# Altium footprint library FootPrintLib_1.PcbLib: 498 footprints (part 17 of 35)
Each footprint in its own frame and in the unit in brackets; x right, y up, seen from the top. Pads: shape width x height; smd on the part's side, far side on the other; paste and mask are expansions set on the pad; w line width, h text height; cw(c..) or ccw(c..) is an arc to the next point about the centre after c.
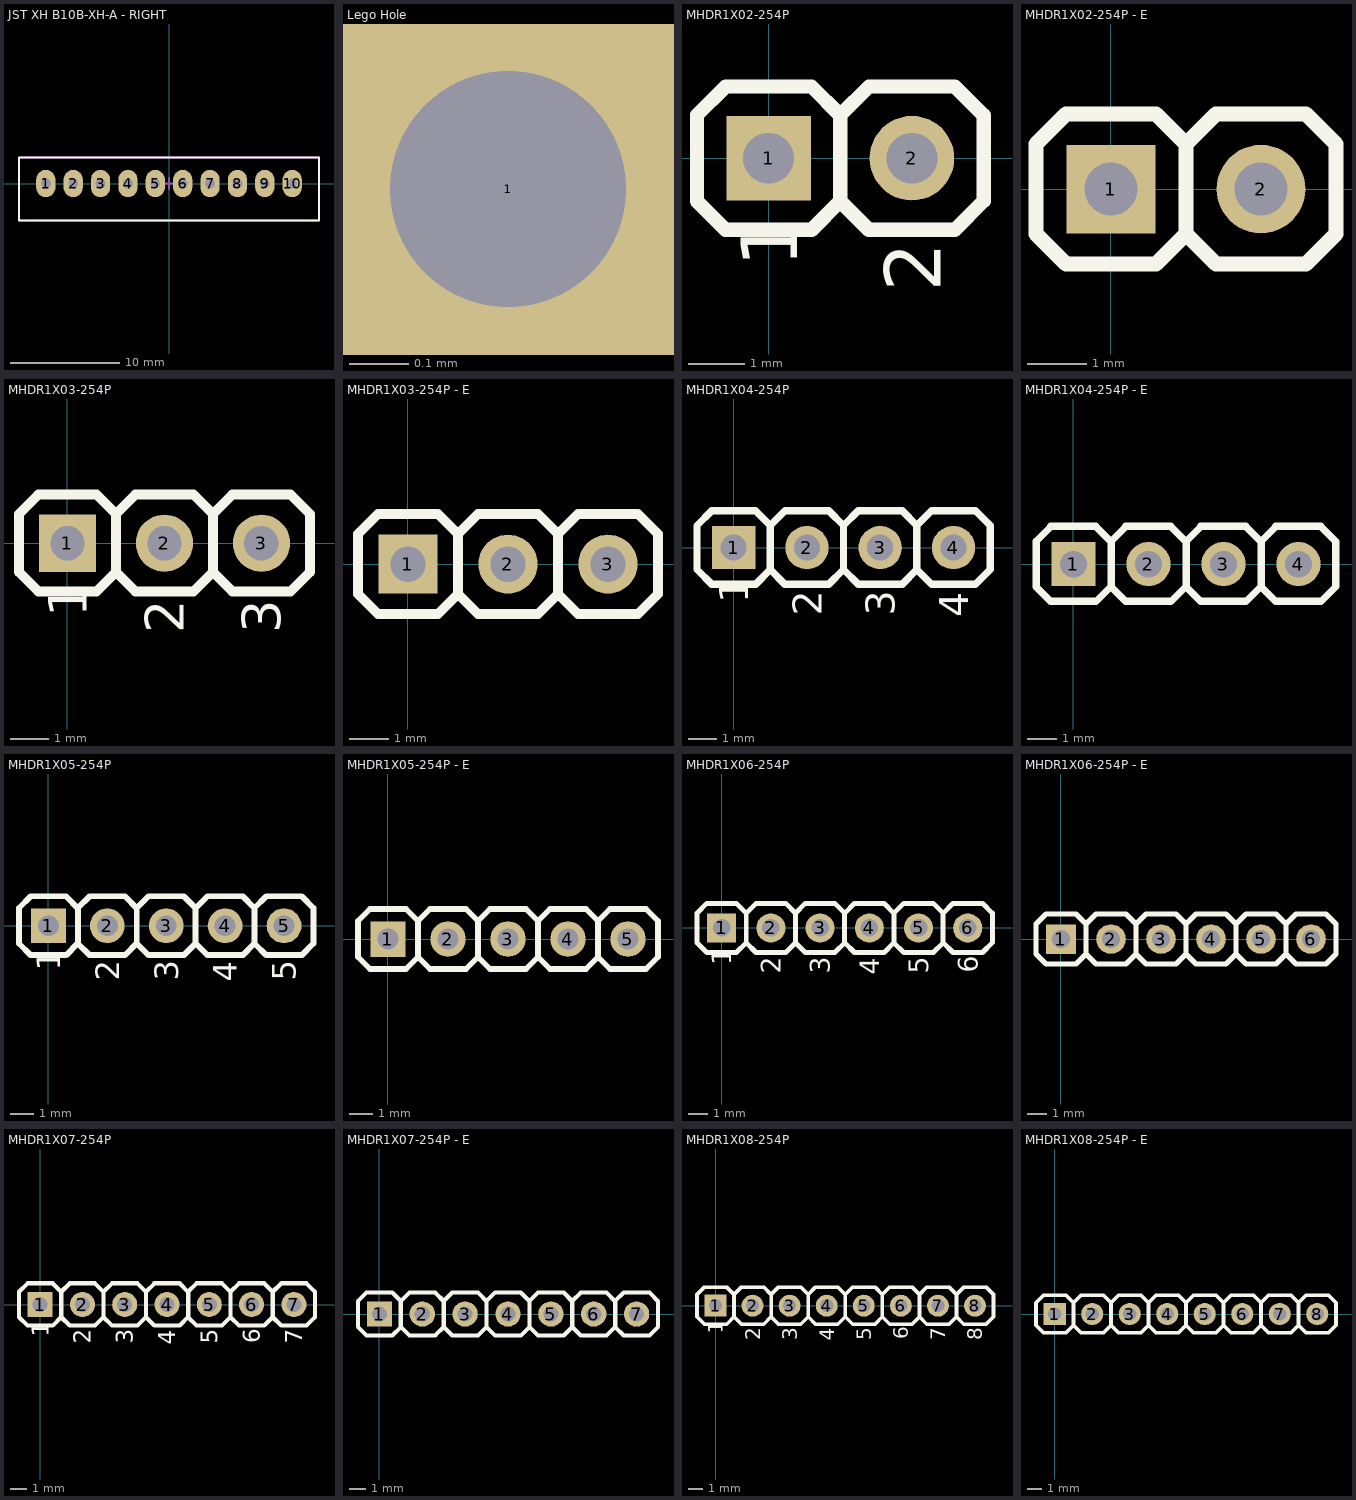
[diagram p16: the footprints below, top view; thin cyan lines are the x and y axes]

## JST XH B10B-XH-A - RIGHT [mm]
height 7
pads (10):
  oval 1.75x2.5 hole 0.9: 1(-11.25,0) 2(-8.75,0) 3(-6.25,0) 4(-3.75,0) 5(-1.25,0) 6(1.25,0) 7(3.75,0) 8(6.25,0) 9(8.75,0) 10(11.25,0)
Top Overlay:
  lines w0.2: -13.7,-3.375 -13.7,2.375 13.7,2.375 13.7,-3.375 -13.7,-3.375
Mechanical 1:
  lines w0.2: -13.7,-3.375 13.7,-3.375 13.7,2.375 -13.7,2.375 -13.7,-3.375
Mechanical 15:
  lines w0.2: -0.5,0 0.5,0 ; 0,-0.5 0,0.5
3D body "S10B-XH-A.stp": height 6.1, standoff -3.4, extent -13.7,-9.2 13.7,2.3

## Lego Hole [mil]
pads (1):
  round 1 hole 1: 1(-101.91,57.71)
via 115,0 diameter 31.5 hole 15.75
via -58.84,99.92 diameter 31.5 hole 15.75
via 58.3,-101.91 diameter 31.5 hole 15.75
via -58.84,-101.91 diameter 31.5 hole 15.75
via 58.3,99.92 diameter 31.5 hole 15.75
via -101.91,-58.84 diameter 31.5 hole 15.75
via 0,115.35 diameter 31.5 hole 15.75
via 100.94,-58.84 diameter 31.5 hole 15.75
via 0,-116.54 diameter 31.5 hole 15.75
via -101.91,57.71 diameter 31.5 hole 15.75
via -117.68,0 diameter 31.5 hole 15.75
via 100.94,57.71 diameter 31.5 hole 15.75
via 0,0 diameter 236.22 hole 192.91

## MHDR1X02-254P [mm] "Male Header 1X02 with 2.54 mm Pitch"
height 8.4
pads (2):
  rect 1.5x1.5 hole 0.9: 1(0,0)
  round 1.5 hole 0.9: 2(2.54,0)
Top Overlay:
  lines w0.254: 1.27,-0.762 1.777,-1.268 3.302,-1.268 3.81,-0.76 3.81,0.762 3.301,1.272 1.778,1.272 1.27,0.764 ; -1.27,-0.762 -0.763,-1.268 0.762,-1.268 1.27,-0.76 1.27,0.762 0.761,1.272 -0.762,1.272 -1.27,0.764 -1.27,-0.762
  text "1" at 0.508,-1.936 h1
  text "2" at 3.048,-2.364 h1
3D body "PIN.STEP": height 8.43, standoff -2.49, extent 1.27,-1.27 3.81,1.27
3D body "PIN.STEP": height 8.43, standoff -2.49, extent -1.27,-1.27 1.27,1.27

## MHDR1X02-254P - E [mm] "Male Header 1X02 with 2.54 mm Pitch"
height 8.4
pads (2):
  rect 1.5x1.5 hole 0.9: 1(0,0)
  round 1.5 hole 0.9: 2(2.54,0)
Top Overlay:
  lines w0.254: 1.27,-0.762 1.777,-1.268 3.302,-1.268 3.81,-0.76 3.81,0.762 3.301,1.272 1.778,1.272 1.27,0.764 ; -1.27,-0.762 -1.27,0.764 -0.762,1.272 0.761,1.272 1.27,0.762 1.27,-0.76 0.762,-1.268 -0.763,-1.268 -1.27,-0.762
3D body "PIN.STEP": height 8.43, standoff -2.49, extent -1.27,-1.27 1.27,1.27
3D body "PIN.STEP": height 8.43, standoff -2.49, extent 1.27,-1.27 3.81,1.27

## MHDR1X03-254P [mm] "Male Header 1X03 with 2.54 mm Pitch"
height 8.4
pads (3):
  rect 1.5x1.5 hole 0.9: 1(0,0)
  round 1.5 hole 0.9: 2(2.54,0) 3(5.08,0)
Top Overlay:
  lines w0.254: 1.27,-0.762 1.777,-1.268 3.302,-1.268 3.81,-0.76 3.81,0.762 3.301,1.272 1.778,1.272 1.27,0.764 ; 3.81,-0.762 4.317,-1.268 5.842,-1.268 6.35,-0.76 6.35,0.762 5.841,1.272 4.318,1.272 3.81,0.764 ; -1.27,-0.762 -0.763,-1.268 0.762,-1.268 1.27,-0.76 1.27,0.762 0.761,1.272 -0.762,1.272 -1.27,0.764 -1.27,-0.762
  text "1" at 0.508,-1.936 h1
  text "2" at 3.048,-2.364 h1
  text "3" at 5.588,-2.364 h1
3D body "PIN.STEP": height 8.43, standoff -2.49, extent -1.27,-1.27 1.27,1.27
3D body "PIN_mid.STEP": height 8.43, standoff -2.49, extent 1.27,-1.27 3.81,1.27
3D body "PIN.STEP": height 8.43, standoff -2.49, extent 3.81,-1.27 6.35,1.27

## MHDR1X03-254P - E [mm] "Male Header 1X03 with 2.54 mm Pitch"
height 8.4
pads (3):
  rect 1.5x1.5 hole 0.9: 1(0,0)
  round 1.5 hole 0.9: 2(2.54,0) 3(5.08,0)
Top Overlay:
  lines w0.254: 1.27,-0.762 1.777,-1.268 3.302,-1.268 3.81,-0.76 3.81,0.762 3.301,1.272 1.778,1.272 1.27,0.764 ; 3.81,-0.762 4.317,-1.268 5.842,-1.268 6.35,-0.76 6.35,0.762 5.841,1.272 4.318,1.272 3.81,0.764 ; -1.27,-0.762 -0.763,-1.268 0.762,-1.268 1.27,-0.76 1.27,0.762 0.761,1.272 -0.762,1.272 -1.27,0.764 -1.27,-0.762
3D body "PIN.STEP": height 8.43, standoff -2.49, extent 3.81,-1.27 6.35,1.27
3D body "PIN_mid.STEP": height 8.43, standoff -2.49, extent 1.27,-1.27 3.81,1.27
3D body "PIN.STEP": height 8.43, standoff -2.49, extent -1.27,-1.27 1.27,1.27

## MHDR1X04-254P [mm] "Male Header 1X04 with 2.54 mm Pitch"
height 8.4
pads (4):
  rect 1.5x1.5 hole 0.9: 1(0,0)
  round 1.5 hole 0.9: 2(2.54,0) 3(5.08,0) 4(7.62,0)
Top Overlay:
  lines w0.254: 1.27,-0.762 1.777,-1.268 3.302,-1.268 3.81,-0.76 3.81,0.762 3.301,1.272 1.778,1.272 1.27,0.764 ; 3.81,-0.762 4.317,-1.268 5.842,-1.268 6.35,-0.76 6.35,0.762 5.841,1.272 4.318,1.272 3.81,0.764 ; 6.35,-0.762 6.857,-1.268 8.382,-1.268 8.89,-0.76 8.89,0.762 8.381,1.272 6.858,1.272 6.35,0.764 ; -1.27,-0.762 -1.27,0.764 -0.762,1.272 0.761,1.272 1.27,0.762 1.27,-0.76 0.762,-1.268 -0.763,-1.268 -1.27,-0.762
  text "4" at 8.128,-2.412 h1
  text "3" at 5.588,-2.364 h1
  text "2" at 3.048,-2.364 h1
  text "1" at 0.508,-1.936 h1
3D body "PIN.STEP": height 8.43, standoff -2.49, extent 6.35,-1.27 8.89,1.27
3D body "PIN_mid.STEP": height 8.43, standoff -2.49, extent 3.81,-1.27 6.35,1.27
3D body "PIN_mid.STEP": height 8.43, standoff -2.49, extent 1.27,-1.27 3.81,1.27
3D body "PIN.STEP": height 8.43, standoff -2.49, extent -1.27,-1.27 1.27,1.27

## MHDR1X04-254P - E [mm] "Male Header 1X04 with 2.54 mm Pitch"
height 8.4
pads (4):
  rect 1.5x1.5 hole 0.9: 1(0,0)
  round 1.5 hole 0.9: 2(2.54,0) 3(5.08,0) 4(7.62,0)
Top Overlay:
  lines w0.254: 1.27,-0.762 1.777,-1.268 3.302,-1.268 3.81,-0.76 3.81,0.762 3.301,1.272 1.778,1.272 1.27,0.764 ; 3.81,-0.762 4.317,-1.268 5.842,-1.268 6.35,-0.76 6.35,0.762 5.841,1.272 4.318,1.272 3.81,0.764 ; 6.35,-0.762 6.857,-1.268 8.382,-1.268 8.89,-0.76 8.89,0.762 8.381,1.272 6.858,1.272 6.35,0.764 ; -1.27,-0.762 -0.763,-1.268 0.762,-1.268 1.27,-0.76 1.27,0.762 0.761,1.272 -0.762,1.272 -1.27,0.764 -1.27,-0.762
3D body "PIN.STEP": height 8.43, standoff -2.49, extent -1.27,-1.27 1.27,1.27
3D body "PIN_mid.STEP": height 8.43, standoff -2.49, extent 1.27,-1.27 3.81,1.27
3D body "PIN_mid.STEP": height 8.43, standoff -2.49, extent 3.81,-1.27 6.35,1.27
3D body "PIN.STEP": height 8.43, standoff -2.49, extent 6.35,-1.27 8.89,1.27

## MHDR1X05-254P [mm] "Male Header 1X05 with 2.54 mm Pitch"
height 8.4
pads (5):
  rect 1.5x1.5 hole 0.9: 1(0,0)
  round 1.5 hole 0.9: 2(2.54,0) 3(5.08,0) 4(7.62,0) 5(10.16,0)
Top Overlay:
  lines w0.254: 1.27,-0.762 1.777,-1.268 3.302,-1.268 3.81,-0.76 3.81,0.762 3.301,1.272 1.778,1.272 1.27,0.764 ; 3.81,-0.762 4.317,-1.268 5.842,-1.268 6.35,-0.76 6.35,0.762 5.841,1.272 4.318,1.272 3.81,0.764 ; 6.35,-0.762 6.857,-1.268 8.382,-1.268 8.89,-0.76 8.89,0.762 8.381,1.272 6.858,1.272 6.35,0.764 ; 8.89,-0.762 9.397,-1.268 10.922,-1.268 11.43,-0.76 11.43,0.762 10.921,1.272 9.398,1.272 8.89,0.764 ; -1.27,-0.762 -1.27,0.764 -0.762,1.272 0.761,1.272 1.27,0.762 1.27,-0.76 0.762,-1.268 -0.763,-1.268 -1.27,-0.762
  text "1" at 0.508,-1.936 h1
  text "1" at 0.508,-1.936 h1
  text "2" at 3.048,-2.364 h1
  text "3" at 5.588,-2.364 h1
  text "4" at 8.128,-2.412 h1
  text "5" at 10.668,-2.364 h1
3D body "PIN.STEP": height 8.43, standoff -2.49, extent -1.27,-1.27 1.27,1.27
3D body "PIN_mid.STEP": height 8.43, standoff -2.49, extent 1.27,-1.27 3.81,1.27
3D body "PIN_mid.STEP": height 8.43, standoff -2.49, extent 3.81,-1.27 6.35,1.27
3D body "PIN_mid.STEP": height 8.43, standoff -2.49, extent 6.35,-1.27 8.89,1.27
3D body "PIN.STEP": height 8.43, standoff -2.49, extent 8.89,-1.27 11.43,1.27

## MHDR1X05-254P - E [mm] "Male Header 1X05 with 2.54 mm Pitch"
height 8.4
pads (5):
  rect 1.5x1.5 hole 0.9: 1(0,0)
  round 1.5 hole 0.9: 2(2.54,0) 3(5.08,0) 4(7.62,0) 5(10.16,0)
Top Overlay:
  lines w0.254: 1.27,-0.762 1.777,-1.268 3.302,-1.268 3.81,-0.76 3.81,0.762 3.301,1.272 1.778,1.272 1.27,0.764 ; 3.81,-0.762 4.317,-1.268 5.842,-1.268 6.35,-0.76 6.35,0.762 5.841,1.272 4.318,1.272 3.81,0.764 ; 6.35,-0.762 6.857,-1.268 8.382,-1.268 8.89,-0.76 8.89,0.762 8.381,1.272 6.858,1.272 6.35,0.764 ; 8.89,-0.762 9.397,-1.268 10.922,-1.268 11.43,-0.76 11.43,0.762 10.921,1.272 9.398,1.272 8.89,0.764 ; -1.27,-0.762 -0.763,-1.268 0.762,-1.268 1.27,-0.76 1.27,0.762 0.761,1.272 -0.762,1.272 -1.27,0.764 -1.27,-0.762
3D body "PIN.STEP": height 8.43, standoff -2.49, extent 8.89,-1.27 11.43,1.27
3D body "PIN_mid.STEP": height 8.43, standoff -2.49, extent 6.35,-1.27 8.89,1.27
3D body "PIN_mid.STEP": height 8.43, standoff -2.49, extent 3.81,-1.27 6.35,1.27
3D body "PIN_mid.STEP": height 8.43, standoff -2.49, extent 1.27,-1.27 3.81,1.27
3D body "PIN.STEP": height 8.43, standoff -2.49, extent -1.27,-1.27 1.27,1.27

## MHDR1X06-254P [mm] "Male Header 1X06 with 2.54 mm Pitch"
height 8.4
pads (6):
  rect 1.5x1.5 hole 0.9: 1(0,0)
  round 1.5 hole 0.9: 2(2.54,0) 3(5.08,0) 4(7.62,0) 5(10.16,0) 6(12.7,0)
Top Overlay:
  lines w0.254: 1.27,-0.762 1.777,-1.268 3.302,-1.268 3.81,-0.76 3.81,0.762 3.301,1.272 1.778,1.272 1.27,0.764 ; 3.81,-0.762 4.317,-1.268 5.842,-1.268 6.35,-0.76 6.35,0.762 5.841,1.272 4.318,1.272 3.81,0.764 ; 6.35,-0.762 6.857,-1.268 8.382,-1.268 8.89,-0.76 8.89,0.762 8.381,1.272 6.858,1.272 6.35,0.764 ; 8.89,-0.762 9.397,-1.268 10.922,-1.268 11.43,-0.76 11.43,0.762 10.921,1.272 9.398,1.272 8.89,0.764 ; 11.43,-0.762 11.937,-1.268 13.462,-1.268 13.97,-0.76 13.97,0.762 13.461,1.272 11.938,1.272 11.43,0.764 ; -1.27,-0.762 -1.27,0.764 -0.762,1.272 0.761,1.272 1.27,0.762 1.27,-0.76 0.762,-1.268 -0.763,-1.268 -1.27,-0.762
  text "6" at 13.208,-2.317 h1
  text "5" at 10.668,-2.364 h1
  text "4" at 8.128,-2.412 h1
  text "3" at 5.588,-2.364 h1
  text "2" at 3.048,-2.364 h1
  text "1" at 0.508,-1.936 h1
  text "1" at 0.508,-1.936 h1
3D body "PIN.STEP": height 8.43, standoff -2.49, extent 11.43,-1.27 13.97,1.27
3D body "PIN_mid.STEP": height 8.43, standoff -2.49, extent 8.89,-1.27 11.43,1.27
3D body "PIN_mid.STEP": height 8.43, standoff -2.49, extent 6.35,-1.27 8.89,1.27
3D body "PIN_mid.STEP": height 8.43, standoff -2.49, extent 3.81,-1.27 6.35,1.27
3D body "PIN_mid.STEP": height 8.43, standoff -2.49, extent 1.27,-1.27 3.81,1.27
3D body "PIN.STEP": height 8.43, standoff -2.49, extent -1.27,-1.27 1.27,1.27

## MHDR1X06-254P - E [mm] "Male Header 1X06 with 2.54 mm Pitch"
height 8.4
pads (6):
  rect 1.5x1.5 hole 0.9: 1(0,0)
  round 1.5 hole 0.9: 2(2.54,0) 3(5.08,0) 4(7.62,0) 5(10.16,0) 6(12.7,0)
Top Overlay:
  lines w0.254: 1.27,-0.762 1.777,-1.268 3.302,-1.268 3.81,-0.76 3.81,0.762 3.301,1.272 1.778,1.272 1.27,0.764 ; 3.81,-0.762 4.317,-1.268 5.842,-1.268 6.35,-0.76 6.35,0.762 5.841,1.272 4.318,1.272 3.81,0.764 ; 6.35,-0.762 6.857,-1.268 8.382,-1.268 8.89,-0.76 8.89,0.762 8.381,1.272 6.858,1.272 6.35,0.764 ; 8.89,-0.762 9.397,-1.268 10.922,-1.268 11.43,-0.76 11.43,0.762 10.921,1.272 9.398,1.272 8.89,0.764 ; 11.43,-0.762 11.937,-1.268 13.462,-1.268 13.97,-0.76 13.97,0.762 13.461,1.272 11.938,1.272 11.43,0.764 ; -1.27,-0.762 -1.27,0.764 -0.762,1.272 0.761,1.272 1.27,0.762 1.27,-0.76 0.762,-1.268 -0.763,-1.268 -1.27,-0.762
3D body "PIN.STEP": height 8.43, standoff -2.49, extent -1.27,-1.27 1.27,1.27
3D body "PIN_mid.STEP": height 8.43, standoff -2.49, extent 1.27,-1.27 3.81,1.27
3D body "PIN_mid.STEP": height 8.43, standoff -2.49, extent 3.81,-1.27 6.35,1.27
3D body "PIN_mid.STEP": height 8.43, standoff -2.49, extent 6.35,-1.27 8.89,1.27
3D body "PIN_mid.STEP": height 8.43, standoff -2.49, extent 8.89,-1.27 11.43,1.27
3D body "PIN.STEP": height 8.43, standoff -2.49, extent 11.43,-1.27 13.97,1.27

## MHDR1X07-254P [mm] "Male Header 1X07 with 2.54 mm Pitch"
height 8.4
pads (7):
  rect 1.5x1.5 hole 0.9: 1(0,0)
  round 1.5 hole 0.9: 2(2.54,0) 3(5.08,0) 4(7.62,0) 5(10.16,0) 6(12.7,0) 7(15.24,0)
Top Overlay:
  lines w0.254: 1.27,-0.762 1.777,-1.268 3.302,-1.268 3.81,-0.76 3.81,0.762 3.301,1.272 1.778,1.272 1.27,0.764 ; 3.81,-0.762 4.317,-1.268 5.842,-1.268 6.35,-0.76 6.35,0.762 5.841,1.272 4.318,1.272 3.81,0.764 ; 6.35,-0.762 6.857,-1.268 8.382,-1.268 8.89,-0.76 8.89,0.762 8.381,1.272 6.858,1.272 6.35,0.764 ; 8.89,-0.762 9.397,-1.268 10.922,-1.268 11.43,-0.76 11.43,0.762 10.921,1.272 9.398,1.272 8.89,0.764 ; 11.43,-0.762 11.937,-1.268 13.462,-1.268 13.97,-0.76 13.97,0.762 13.461,1.272 11.938,1.272 11.43,0.764 ; 13.97,-0.762 14.477,-1.268 16.002,-1.268 16.51,-0.76 16.51,0.762 16.001,1.272 14.478,1.272 13.97,0.764 ; -1.27,-0.762 -1.27,0.764 -0.762,1.272 0.761,1.272 1.27,0.762 1.27,-0.76 0.762,-1.268 -0.763,-1.268 -1.27,-0.762
  text "7" at 15.748,-2.364 h1
  text "6" at 13.208,-2.317 h1
  text "5" at 10.668,-2.364 h1
  text "4" at 8.128,-2.412 h1
  text "3" at 5.588,-2.364 h1
  text "2" at 3.048,-2.364 h1
  text "1" at 0.508,-1.936 h1
  text "1" at 0.508,-1.936 h1
3D body "PIN.STEP": height 8.43, standoff -2.49, extent -1.27,-1.27 1.27,1.27
3D body "PIN_mid.STEP": height 8.43, standoff -2.49, extent 1.27,-1.27 3.81,1.27
3D body "PIN_mid.STEP": height 8.43, standoff -2.49, extent 3.81,-1.27 6.35,1.27
3D body "PIN_mid.STEP": height 8.43, standoff -2.49, extent 6.35,-1.27 8.89,1.27
3D body "PIN_mid.STEP": height 8.43, standoff -2.49, extent 8.89,-1.27 11.43,1.27
3D body "PIN_mid.STEP": height 8.43, standoff -2.49, extent 11.43,-1.27 13.97,1.27
3D body "PIN.STEP": height 8.43, standoff -2.49, extent 13.97,-1.27 16.51,1.27

## MHDR1X07-254P - E [mm] "Male Header 1X07 with 2.54 mm Pitch"
height 8.4
pads (7):
  rect 1.5x1.5 hole 0.9: 1(0,0)
  round 1.5 hole 0.9: 2(2.54,0) 3(5.08,0) 4(7.62,0) 5(10.16,0) 6(12.7,0) 7(15.24,0)
Top Overlay:
  lines w0.254: 1.27,-0.762 1.777,-1.268 3.302,-1.268 3.81,-0.76 3.81,0.762 3.301,1.272 1.778,1.272 1.27,0.764 ; 3.81,-0.762 4.317,-1.268 5.842,-1.268 6.35,-0.76 6.35,0.762 5.841,1.272 4.318,1.272 3.81,0.764 ; 6.35,-0.762 6.857,-1.268 8.382,-1.268 8.89,-0.76 8.89,0.762 8.381,1.272 6.858,1.272 6.35,0.764 ; 8.89,-0.762 9.397,-1.268 10.922,-1.268 11.43,-0.76 11.43,0.762 10.921,1.272 9.398,1.272 8.89,0.764 ; 11.43,-0.762 11.937,-1.268 13.462,-1.268 13.97,-0.76 13.97,0.762 13.461,1.272 11.938,1.272 11.43,0.764 ; 13.97,-0.762 14.477,-1.268 16.002,-1.268 16.51,-0.76 16.51,0.762 16.001,1.272 14.478,1.272 13.97,0.764 ; -1.27,-0.762 -1.27,0.764 -0.762,1.272 0.761,1.272 1.27,0.762 1.27,-0.76 0.762,-1.268 -0.763,-1.268 -1.27,-0.762
3D body "PIN.STEP": height 8.43, standoff -2.49, extent 13.97,-1.27 16.51,1.27
3D body "PIN_mid.STEP": height 8.43, standoff -2.49, extent 11.43,-1.27 13.97,1.27
3D body "PIN_mid.STEP": height 8.43, standoff -2.49, extent 8.89,-1.27 11.43,1.27
3D body "PIN_mid.STEP": height 8.43, standoff -2.49, extent 6.35,-1.27 8.89,1.27
3D body "PIN_mid.STEP": height 8.43, standoff -2.49, extent 3.81,-1.27 6.35,1.27
3D body "PIN_mid.STEP": height 8.43, standoff -2.49, extent 1.27,-1.27 3.81,1.27
3D body "PIN.STEP": height 8.43, standoff -2.49, extent -1.27,-1.27 1.27,1.27

## MHDR1X08-254P [mm] "Male Header 1X08 with 2.54 mm Pitch"
height 8.4
pads (8):
  rect 1.5x1.5 hole 0.9: 1(0,0)
  round 1.5 hole 0.9: 2(2.54,0) 3(5.08,0) 4(7.62,0) 5(10.16,0) 6(12.7,0) 7(15.24,0) 8(17.78,0)
Top Overlay:
  lines w0.254: 1.27,-0.762 1.777,-1.268 3.302,-1.268 3.81,-0.76 3.81,0.762 3.301,1.272 1.778,1.272 1.27,0.764 ; 3.81,-0.762 4.317,-1.268 5.842,-1.268 6.35,-0.76 6.35,0.762 5.841,1.272 4.318,1.272 3.81,0.764 ; 6.35,-0.762 6.857,-1.268 8.382,-1.268 8.89,-0.76 8.89,0.762 8.381,1.272 6.858,1.272 6.35,0.764 ; 8.89,-0.762 9.397,-1.268 10.922,-1.268 11.43,-0.76 11.43,0.762 10.921,1.272 9.398,1.272 8.89,0.764 ; 11.43,-0.762 11.937,-1.268 13.462,-1.268 13.97,-0.76 13.97,0.762 13.461,1.272 11.938,1.272 11.43,0.764 ; 13.97,-0.762 14.477,-1.268 16.002,-1.268 16.51,-0.76 16.51,0.762 16.001,1.272 14.478,1.272 13.97,0.764 ; 16.51,-0.762 17.017,-1.268 18.542,-1.268 19.05,-0.76 19.05,0.762 18.541,1.272 17.018,1.272 16.51,0.764 ; -1.27,-0.762 -0.763,-1.268 0.762,-1.268 1.27,-0.76 1.27,0.762 0.761,1.272 -0.762,1.272 -1.27,0.764 -1.27,-0.762
  text "1" at 0.508,-1.936 h1
  text "1" at 0.508,-1.936 h1
  text "2" at 3.048,-2.364 h1
  text "3" at 5.588,-2.364 h1
  text "4" at 8.128,-2.412 h1
  text "5" at 10.668,-2.364 h1
  text "6" at 13.208,-2.317 h1
  text "7" at 15.748,-2.364 h1
  text "8" at 18.288,-2.364 h1
3D body "PIN.STEP": height 8.43, standoff -2.49, extent 16.51,-1.27 19.05,1.27
3D body "PIN_mid.STEP": height 8.43, standoff -2.49, extent 13.97,-1.27 16.51,1.27
3D body "PIN_mid.STEP": height 8.43, standoff -2.49, extent 11.43,-1.27 13.97,1.27
3D body "PIN_mid.STEP": height 8.43, standoff -2.49, extent 8.89,-1.27 11.43,1.27
3D body "PIN_mid.STEP": height 8.43, standoff -2.49, extent 6.35,-1.27 8.89,1.27
3D body "PIN_mid.STEP": height 8.43, standoff -2.49, extent 3.81,-1.27 6.35,1.27
3D body "PIN_mid.STEP": height 8.43, standoff -2.49, extent 1.27,-1.27 3.81,1.27
3D body "PIN.STEP": height 8.43, standoff -2.49, extent -1.27,-1.27 1.27,1.27

## MHDR1X08-254P - E [mm] "Male Header 1X08 with 2.54 mm Pitch"
height 8.4
pads (8):
  rect 1.5x1.5 hole 0.9: 1(0,0)
  round 1.5 hole 0.9: 2(2.54,0) 3(5.08,0) 4(7.62,0) 5(10.16,0) 6(12.7,0) 7(15.24,0) 8(17.78,0)
Top Overlay:
  lines w0.254: 1.27,-0.762 1.777,-1.268 3.302,-1.268 3.81,-0.76 3.81,0.762 3.301,1.272 1.778,1.272 1.27,0.764 ; 3.81,-0.762 4.317,-1.268 5.842,-1.268 6.35,-0.76 6.35,0.762 5.841,1.272 4.318,1.272 3.81,0.764 ; 6.35,-0.762 6.857,-1.268 8.382,-1.268 8.89,-0.76 8.89,0.762 8.381,1.272 6.858,1.272 6.35,0.764 ; 8.89,-0.762 9.397,-1.268 10.922,-1.268 11.43,-0.76 11.43,0.762 10.921,1.272 9.398,1.272 8.89,0.764 ; 11.43,-0.762 11.937,-1.268 13.462,-1.268 13.97,-0.76 13.97,0.762 13.461,1.272 11.938,1.272 11.43,0.764 ; 13.97,-0.762 14.477,-1.268 16.002,-1.268 16.51,-0.76 16.51,0.762 16.001,1.272 14.478,1.272 13.97,0.764 ; 16.51,-0.762 17.017,-1.268 18.542,-1.268 19.05,-0.76 19.05,0.762 18.541,1.272 17.018,1.272 16.51,0.764 ; -1.27,-0.762 -0.763,-1.268 0.762,-1.268 1.27,-0.76 1.27,0.762 0.761,1.272 -0.762,1.272 -1.27,0.764 -1.27,-0.762
3D body "PIN.STEP": height 8.43, standoff -2.49, extent -1.27,-1.27 1.27,1.27
3D body "PIN_mid.STEP": height 8.43, standoff -2.49, extent 1.27,-1.27 3.81,1.27
3D body "PIN_mid.STEP": height 8.43, standoff -2.49, extent 3.81,-1.27 6.35,1.27
3D body "PIN_mid.STEP": height 8.43, standoff -2.49, extent 6.35,-1.27 8.89,1.27
3D body "PIN_mid.STEP": height 8.43, standoff -2.49, extent 8.89,-1.27 11.43,1.27
3D body "PIN_mid.STEP": height 8.43, standoff -2.49, extent 11.43,-1.27 13.97,1.27
3D body "PIN_mid.STEP": height 8.43, standoff -2.49, extent 13.97,-1.27 16.51,1.27
3D body "PIN.STEP": height 8.43, standoff -2.49, extent 16.51,-1.27 19.05,1.27